# Altium schematic symbol library Altium_Lib_Haris.SchLib: 265 symbols (part 2 of 2)
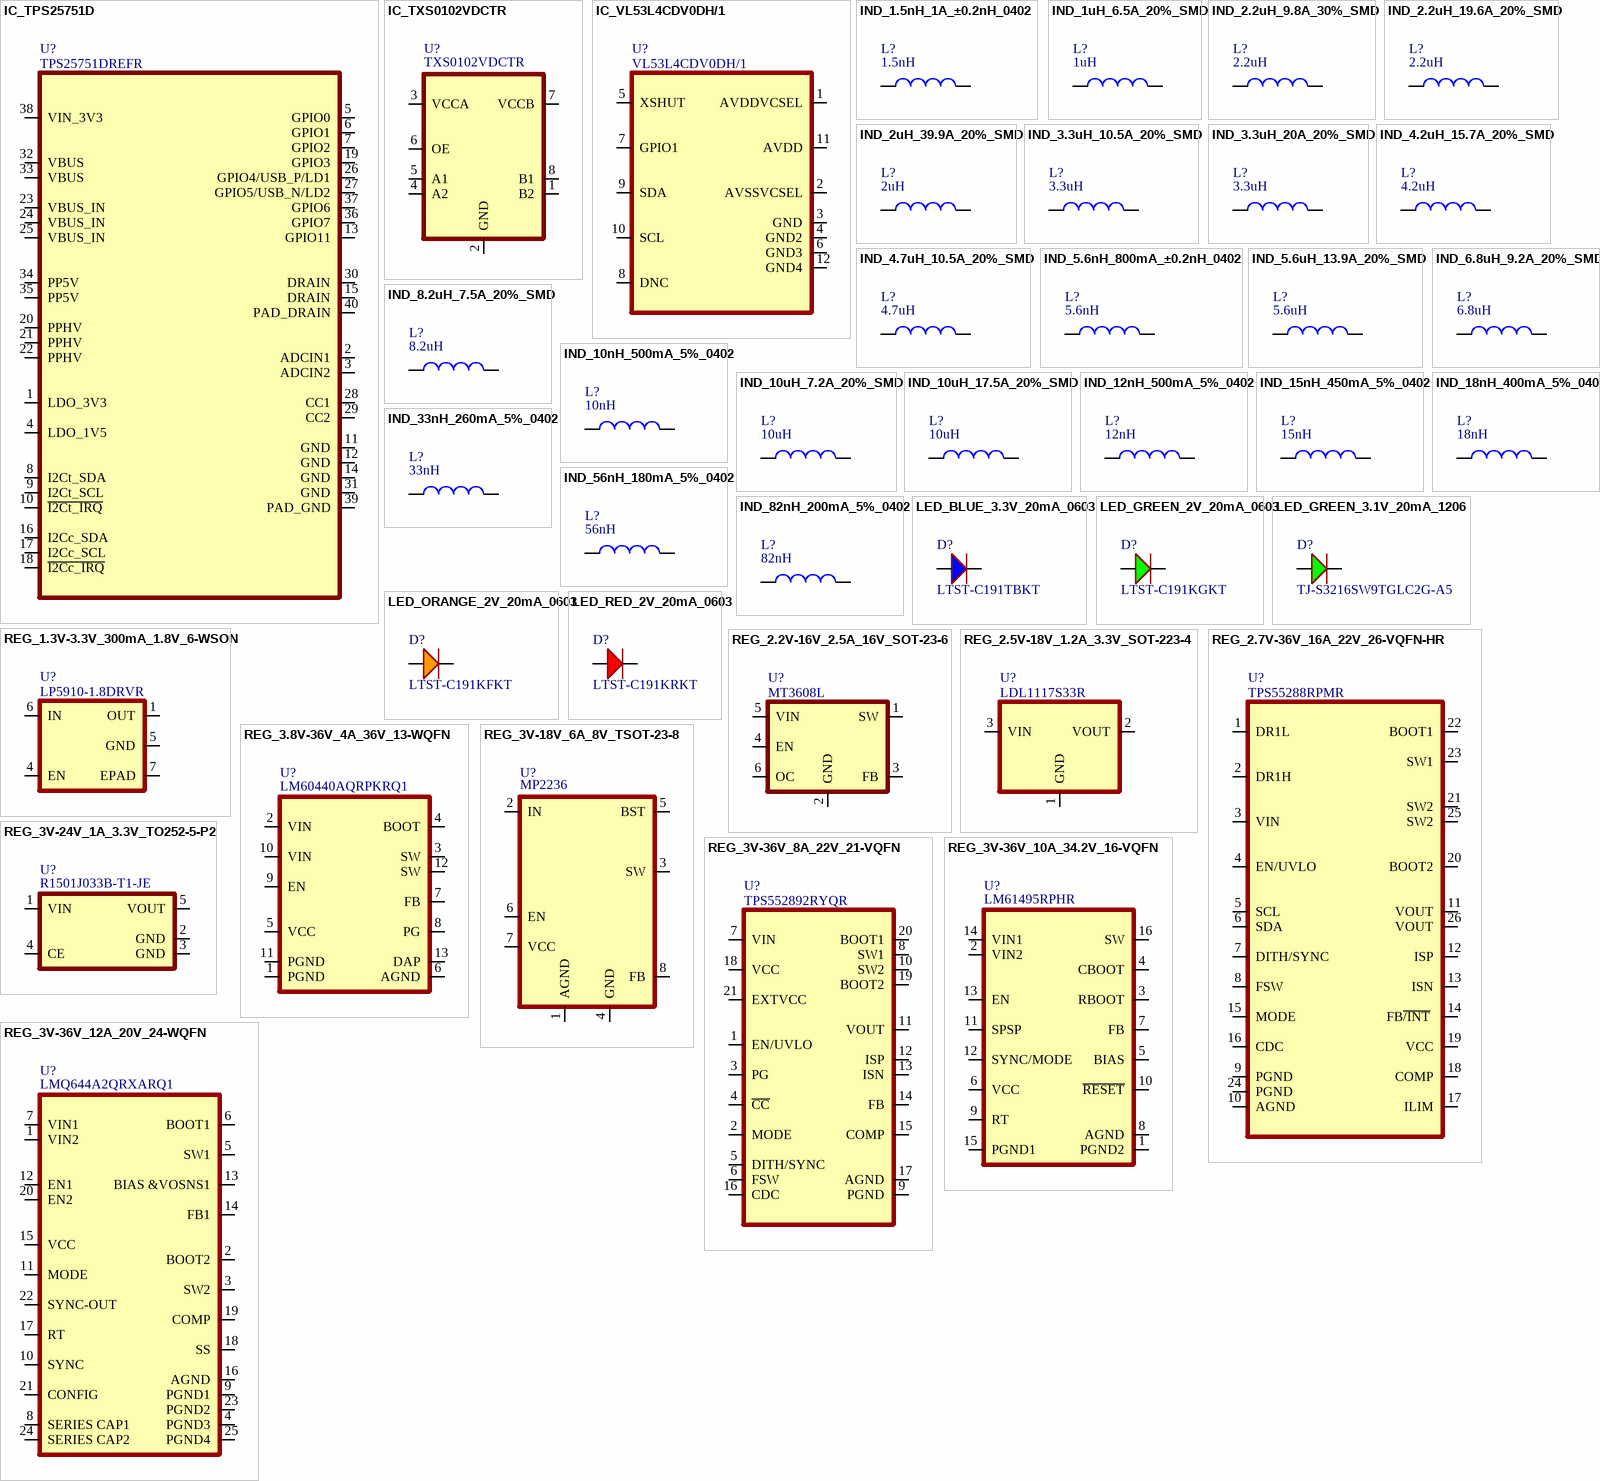
[diagram p9: symbols IC_TPS25751D to REG_3V-36V_12A_20V_24-WQFN]

## IC_TPS25751D
designator U?, comment TPS25751DREFR
USB, Type-C Controller PMIC 38-WQFN (4x6); Manufacturer: Texas Instruments; Manufacturer Part Number: TPS25751DREFR; Supplier: Digikey; Supplier Part Number: 296-TPS25751DREFRTR-ND; Case/Package: 38-WQFN
footprint QFN40P400X600X100-39N
pins: 1 LDO_3V3, 2 ADCIN1, 3 ADCIN2, 4 LDO_1V5, 5 GPIO0, 6 GPIO1, 7 GPIO2, 8 I2Ct_SDA, 9 I2Ct_SCL, 10 ~{I2Ct_IRQ}, 11 GND, 12 GND, 13 GPIO11, 14 GND, 15 DRAIN, 16 I2Cc_SDA, 17 I2Cc_SCL, 18 ~{I2Cc_IRQ}, 19 GPIO3, 20 PPHV, 21 PPHV, 22 PPHV, 23 VBUS_IN, 24 VBUS_IN, 25 VBUS_IN, 26 GPIO4/USB_P/LD1, 27 GPIO5/USB_N/LD2, 28 CC1, 29 CC2, 30 DRAIN, 31 GND, 32 VBUS, 33 VBUS, 34 PP5V, 35 PP5V, 36 GPIO7, 37 GPIO6, 38 VIN_3V3, 39 PAD_GND, 40 PAD_DRAIN

## IC_TXS0102VDCTR
designator U?, comment TXS0102VDCTR
Voltage Level Translator Bidirectional 1 Circuit 2 Channel 24Mbps SM8; Manufacturer: Texas Instruments; Manufacturer Part Number: TXS0102VDCTR; Supplier: Digikey; Supplier Part Number: 296-TXS0102VDCTR-ND; Case/Package: SM8
pins: 1 B2, 2 GND, 3 VCCA, 4 A2, 5 A1, 6 OE, 7 VCCB, 8 B1

## IC_VL53L4CDV0DH/1
designator U?, comment VL53L4CDV0DH/1
SENSOR OPTICAL 6-18CM I2C; Manufacturer: STMicroelectronics; Manufacturer Part Number: VL53L4CDV0DH/1; Supplier: DigiKey; Supplier Part Number: 497-VL53L4CDV0DH/1TR-ND; ComponentLink1Description: Datasheet; ComponentLink1URL: *
pins: 1 AVDDVCSEL, 2 AVSSVCSEL, 3 GND, 4 GND2, 5 XSHUT, 6 GND3, 7 GPIO1, 8 DNC, 9 SDA, 10 SCL, 11 AVDD, 12 GND4

## IND_1.5nH_1A_±0.2nH_0402
designator L?, comment value 1.5nH  (hidden comment: LQW15AN1N5C00D)
FIXED IND 1.5NH 1A 30 MOHM SMD; Manufacturer: Murata Electronics; Manufacturer Part Number: LQW15AN1N5C00D; Supplier: DigiKey; Supplier Part Number: 490-6783-2-ND; Case/Package: 0402
pins: 1, 2

## IND_1uH_6.5A_20%_SMD
designator L?, comment value 1uH  (hidden comment: XFL5030-102MEC)
FIXED IND 1UH 6.5A 5 MOHM; Manufacturer: Coilcraft; Manufacturer Part Number: XFL5030-102MEC; Supplier: Coilcraft; Supplier Part Number: XFL5030-102MEC; Case/Package: SMD,5.48x5.28
footprint IND_XFL5030-102MEC
pins: 1, 2

## IND_2.2uH_9.8A_30%_SMD
designator L?, comment value 2.2uH  (hidden comment: SRN8040TA-2R2Y)
FIXED IND 2.2UH 7.4A 11.5 MOHM; Manufacturer: Bourns Inc.; Manufacturer Part Number: SRN8040TA-2R2Y; Supplier: Digikey; Supplier Part Number: SRN8040TA-2R2YTR-ND; Case/Package: SMD
footprint IND_SRN8040TA-2R2Y
pins: 1, 2

## IND_2.2uH_19.6A_20%_SMD
designator L?, comment value 2.2uH  (hidden comment: XAL7070-222MEB)
FIXED IND 2.2UH 19.6A 6.33 MOHM; Manufacturer: Coilcraft; Manufacturer Part Number: XAL7070-222MEB; Supplier: Coilcraft; Supplier Part Number: XAL7070-222MEB; Case/Package: SMD,7.5x7.2
footprint IND_XAL7070-222MEB
pins: 1, 2

## IND_2uH_39.9A_20%_SMD
designator L?, comment value 2uH  (hidden comment: XAL1580-202MED)
FIXED IND 1UH 39.9A 2.29 MOHM; Manufacturer: Coilcraft; Manufacturer Part Number: XAL1580-202MED; Supplier: Coilcraft; Supplier Part Number: XAL1580-202MED; Case/Package: SMD,5.48x5.28
footprint IND_ XAL1580-202MED
pins: 1, 2

## IND_3.3uH_10.5A_20%_SMD
designator L?, comment value 3.3uH  (hidden comment: SRP5030HMCT-3R3M)
FIXED IND 3.3UH 10A 21MOHM SMD; Manufacturer: Bourns Inc.; Manufacturer Part Number: SRP5030HMCT-3R3M; Supplier: Digikey; Supplier Part Number: 118-SRP5030HMCT-3R3MTR-ND; Case/Package: SMD; ComponentLink1Description: Datasheet; ComponentLink1URL: https://www.bourns.com/docs/Product-Datasheets/SRP5030HMCT.pdf
footprint IND_5.3x5.2
pins: 1, 2

## IND_3.3uH_20A_20%_SMD
designator L?, comment value 3.3uH  (hidden comment: IHLP3232DZER3R3M01)
FIXED IND 3.3UH 9.2A 17.7 MOHM; Manufacturer: Vishay Dale; Manufacturer Part Number: IHLP3232DZER3R3M01; Supplier: Digikey; Supplier Part Number: 541-1373-2-ND; Case/Package: SMD
footprint IND_IHLP-3232DZ_VIS-M
pins: 1, 2

## IND_4.2uH_15.7A_20%_SMD
designator L?, comment value 4.2uH  (hidden comment: 784325042)
FIXED IND 4.2UH 11A 7.8 MOHM SMD; Manufacturer: Würth Elektronik; Manufacturer Part Number: 784325042; Supplier: Digikey; Supplier Part Number: 732-784325042TR-ND; Case/Package: SMD
footprint WE-HCIA_1050
pins: 1, 2

## IND_4.7uH_10.5A_20%_SMD
designator L?, comment value 4.7uH  (hidden comment: XAL6060-472)
FIXED IND 4.7UH 10.5A 14.4 MOHM; Manufacturer: Coilcraft; Manufacturer Part Number: XAL6060-472; Supplier: Coilcraft; Supplier Part Number: XAL6060-472; Case/Package: SMD
pins: 1, 2

## IND_5.6nH_800mA_±0.2nH_0402
designator L?, comment value 5.6nH  (hidden comment: LQW15AN5N6C10D)
FIXED IND 5.6NH 800MA 51 MOHM; Manufacturer: Murata Electronics; Manufacturer Part Number: LQW15AN5N6C10D; Supplier: DigiKey; Supplier Part Number: 490-6833-2-ND; Case/Package: 0402
pins: 1, 2

## IND_5.6uH_13.9A_20%_SMD
designator L?, comment value 5.6uH  (hidden comment: 74439387056)
FIXED IND 5.6UH 13.9A 13.32 MOHM SMD; Manufacturer: Würth Elektronik; Manufacturer Part Number: 74439387056; Supplier: Digikey; Supplier Part Number: 732-74439387056TR-ND; Case/Package: SMD,7.9x7.6
footprint IND_74439387056
pins: 1, 2

## IND_6.8uH_9.2A_20%_SMD
designator L?, comment value 6.8uH  (hidden comment: XAL6060-682)
FIXED IND 6.8UH 9.2A 20.8 MOHM SMD; Manufacturer: Coilcraft; Manufacturer Part Number: XAL6060-682; Supplier: Mouser; Supplier Part Number: 994-XAL6060-682MEB; Case/Package: SMD,6.56x6.36
pins: 1, 2

## IND_8.2uH_7.5A_20%_SMD
designator L?, comment value 8.2uH  (hidden comment: IHLP2525CZER8R2M01)
FIXED IND 8.2UH 4A 68 MOHM SMD; Manufacturer: Vishay Dale; Manufacturer Part Number: IHLP2525CZER8R2M01; Supplier: Digikey; Supplier Part Number: 541-1012-2-ND; Case/Package: SMD,6.86x6.47
footprint IND_IHLP2525CZER8R2M01
pins: 1, 2

## IND_10nH_500mA_5%_0402
designator L?, comment value 10nH  (hidden comment: LQG15HS10NJ02D)
FIXED IND 10NH 500MA 260 MOHM; Manufacturer: Murata Electronics; Manufacturer Part Number: LQG15HS10NJ02D; Supplier: DigiKey; Supplier Part Number: 490-2623-2-ND; Case/Package: 0402
pins: 1, 2

## IND_10uH_7.2A_20%_SMD
designator L?, comment value 10uH  (hidden comment: SER1360-103KLB)
FIXED IND 10UH 7.2A 10.81 MOHM SMD; Manufacturer: Coilcraft; Manufacturer Part Number: SER1360-103KLB; Supplier: Coilcraft; Supplier Part Number: SER1360-103KLB; Case/Package: SMD,13x13
footprint IND_SER1360-103
pins: 1, 2

## IND_10uH_17.5A_20%_SMD
designator L?, comment value 10uH  (hidden comment: XAL1010-103)
FIXED IND 10UH 17.5A 14.75 MOHM SMD; Manufacturer: Coilcraft; Manufacturer Part Number: XAL1010-103; Supplier: Coilcraft; Supplier Part Number: XAL1010-103; Case/Package: SMD,10x8
footprint IND_XAL1010-103MED
pins: 1, 2

## IND_12nH_500mA_5%_0402
designator L?, comment value 12nH  (hidden comment: LQG15HS12NJ02D)
FIXED IND 12NH 500MA 280 MOHM; Manufacturer: Murata Electronics; Manufacturer Part Number: LQG15HS12NJ02D; Supplier: DigiKey; Supplier Part Number: 490-2624-2-ND; Case/Package: 0402
pins: 1, 2

## IND_15nH_450mA_5%_0402
designator L?, comment value 15nH  (hidden comment: LQG15HS15NJ02D)
FIXED IND 15NH 450MA 320 MOHM; Manufacturer: Murata Electronics; Manufacturer Part Number: LQG15HS15NJ02D; Supplier: DigiKey; Supplier Part Number: 490-2625-2-ND; Case/Package: 0402
pins: 1, 2

## IND_18nH_400mA_5%_0402
designator L?, comment value 18nH  (hidden comment: LQG15HS18NJ02D)
FIXED IND 18NH 400MA 360 MOHM; Manufacturer: Murata Electronics; Manufacturer Part Number: LQG15HS18NJ02D; Supplier: DigiKey; Supplier Part Number: 490-2626-2-ND; Case/Package: 0402
pins: 1, 2

## IND_33nH_260mA_5%_0402
designator L?, comment value 33nH  (hidden comment: LQW15AN33NJ00D)
FIXED IND 33NH 260MA 630 MOHM; Manufacturer: Murata Electronics; Manufacturer Part Number: LQW15AN33NJ00D; Supplier: DigiKey; Supplier Part Number: 490-1152-2-ND; Case/Package: 0402
pins: 1, 2

## IND_56nH_180mA_5%_0402
designator L?, comment value 56nH  (hidden comment: MHQ1005P56NJT000)
FIXED IND 56NH 180MA 1.8 OHM SMD; Manufacturer: TDK; Manufacturer Part Number: MHQ1005P56NJT000; Supplier: Digikey; Supplier Part Number: 445-MHQ1005P56NJT000TR-ND; Case/Package: 0402
pins: 1, 2

## IND_82nH_200mA_5%_0402
designator L?, comment value 82nH  (hidden comment: LQG15HS82NJ02D)
FIXED IND 82NH 200MA 1.2 OHM SMD; Manufacturer: Murata Electronics; Manufacturer Part Number: LQG15HS82NJ02D; Supplier: DigiKey; Supplier Part Number: 490-2634-2-ND; Case/Package: 0402
pins: 1, 2

## LED_BLUE_3.3V_20mA_0603
designator D?, comment LTST-C191TBKT
Blue 470nm LED Indication - Discrete 3.3V 0603 (1608 Metric); Manufacturer: Lite-On Inc.; Value: 20mA; Supplier Part Number: 160-1647-2-ND; Manufacturer Part Number: LTST-C191TBKT; Case/Package: 0603; Supplier: DigiKey
pins: A, K

## LED_GREEN_2V_20mA_0603
designator D?, comment LTST-C191KGKT
Green 571nm LED Indication - Discrete 2V 0603 (1608 Metric); Manufacturer: Lite-On Inc.; Value: 20mA; Supplier Part Number: 160-1446-2-ND; Manufacturer Part Number: LTST-C191KGKT; Case/Package: 0603; Supplier: DigiKey
pins: A, K

## LED_GREEN_3.1V_20mA_1206
designator D?, comment TJ-S3216SW9TGLC2G-A5
LED EMERALD GREEN WATER CLEAR 1206 SMD; Manufacturer: TOGIALED; Value: 20mA; Supplier Part Number: C192678; Manufacturer Part Number: TJ-S3216SW9TGLC2G-A5; Case/Package: 1206; Supplier: LCSC
footprint LED_1206 (1206)
pins: A, K

## LED_ORANGE_2V_20mA_0603
designator D?, comment LTST-C191KFKT
Orange 605nm LED Indication - Discrete 2V 0603 (1608 Metric); Manufacturer: Lite-On Inc.; Value: 20mA; Supplier Part Number: 160-1445-2-ND; Manufacturer Part Number: LTST-C191KFKT; Case/Package: 0603; Supplier: DigiKey
pins: A, K

## LED_RED_2V_20mA_0603
designator D?, comment LTST-C191KRKT
Red 631nm LED Indication - Discrete 2V 0603 (1608 Metric); Manufacturer: Lite-On Inc.; Value: 20mA; Supplier Part Number: 160-1447-2-ND; Manufacturer Part Number: LTST-C191KRKT; Case/Package: 0603; Supplier: DigiKey
pins: A, K

## REG_1.3V-3.3V_300mA_1.8V_6-WSON
designator U?, comment LP5910-1.8DRVR
Linear Voltage Regulator IC Positive Fixed 1 Output 300mA 6-WSON (2x2); Manufacturer: Texas Instruments; Manufacturer Part Number: LP5910-1.8DRVR; Supplier: Digikey; Supplier Part Number: 296-47212-2-ND; Case/Package: 6-WSON (2x2); ComponentLink1Description: Datasheet; ComponentLink1URL: https://www.ti.com/general/docs/suppproductinfo.tsp?distId=10&gotoUrl=https%3A%2F%2Fwww.ti.com%2Flit%2Fgpn%2Flp5910
footprint SON65P200X200X80-7N
pins: 1 OUT, 4 EN, 5 GND, 6 IN, 7 EPAD

## REG_2.2V-16V_2.5A_16V_SOT-23-6
designator U?, comment MT3608L
1.2MHz Boost Adjustable 600mV~20V 2.5A SOT-23-6 Voltage Regulators - DC DC Switching Regulators RoHS; Manufacturer: XI'AN Aerosemi Tech; Manufacturer Part Number: MT3608L; Supplier: LCSC; Supplier Part Number: C2932326; Case/Package: SOT23-6; ComponentLink1Description: Datasheet; ComponentLink1URL: https://www.lcsc.com/datasheet/C2932326.pdf?spm=wm.fly.bg.0.pdf&lcsc_vid=TlkNUgdQRlhXXlUHRlFaUgUFQAULBFEFEVJYUVwHQgUxVlNeQVFfUlFfQFVXXzsOAxUeFF5JWBYZEEoKFBINSQcJGk4NBhADEA4cHkteQ1NADxALGw%3D%3D
footprint SOT23P700X180-6N
pins: 1 SW, 2 GND, 3 FB, 4 EN, 5 VIN (power), 6 OC

## REG_2.5V-18V_1.2A_3.3V_SOT-223-4
designator U?, comment LDL1117S33R
LDO Voltage Regulators 1.2 A High PSRR low dropout linear voltage regulator; Manufacturer: STMicroelectronics; Manufacturer Part Number: LDL1117S33R; Supplier: Mouser; Supplier Part Number: 511-LDL1117S33R; Case/Package: SOT-223-4
pins: 1 GND, 2 VOUT, 3 VIN

## REG_2.7V-36V_16A_22V_26-VQFN-HR
designator U?, comment TPS55288RPMR
Buck-Boost Switching Regulator IC Positive Programmable 0.8V 1 Output 16A 26-PowerVFQFN; Manufacturer: Texas Instruments; Manufacturer Part Number: TPS55288RPMR; Supplier: Digikey; Supplier Part Number: 296-TPS55288RPMRTR-ND; Case/Package: 26VQFN
footprint IC_TPS55288RPMR
pins: 1 DR1L, 2 DR1H, 3 VIN, 4 EN/UVLO, 5 SCL, 6 SDA, 7 DITH/SYNC, 8 FSW, 9 PGND, 10 AGND, 11 VOUT, 12 ISP, 13 ISN, 14 FB~{/INT} , 15 MODE, 16 CDC, 17 ILIM, 18 COMP, 19 VCC, 20 BOOT2, 21 SW2, 22 BOOT1, 23 SW1, 24 PGND, 25 SW2, 26 VOUT

## REG_3.8V-36V_4A_36V_13-WQFN
designator U?, comment LM60440AQRPKRQ1
Buck Switching Regulator IC Positive Adjustable 1V 1 Output 4A 13-PowerWFQFN; Manufacturer: Texas Instruments; Manufacturer Part Number: LM60440AQRPKRQ1; Supplier: Digikey; Supplier Part Number: 296-LM60440AQRPKRQ1TR-ND; Case/Package: 13WQFN
footprint RPK0013A-MFG
pins: 1 PGND, 2 VIN, 3 SW, 4 BOOT, 5 VCC, 6 AGND, 7 FB, 8 PG, 9 EN, 10 VIN, 11 PGND, 12 SW, 13 DAP

## REG_3V-18V_6A_8V_TSOT-23-8
designator U?, comment MP2236
Buck Switching Regulator IC Positive Adjustable 0.6V 1 Output 6A SOT-23-8 Thin, TSOT-23-8; Manufacturer: Monolithic Power Systems Inc.; Manufacturer Part Number: MP2236CGJ-Z; Supplier: Digikey; Supplier Part Number: 1589-MP2236CGJ-ZTR-ND; Case/Package: TSOT-23-8; ComponentLink1Description: Datasheet; ComponentLink1URL: https://www.monolithicpower.com/en/documentview/productdocument/index/version/2/document_type/Datasheet/lang/en/sku/MP2236/document_id/4411/
footprint TSOT65P280X145-8N
pins: 1 AGND, 2 IN, 3 SW, 4 GND, 5 BST, 6 EN, 7 VCC, 8 FB

## REG_3V-24V_1A_3.3V_TO252-5-P2
designator U?, comment R1501J033B-T1-JE
Linear Voltage Regulator IC Positive Fixed 1 Output 1A TO-252-5-P2; Manufacturer: Nisshinbo Micro Devices Inc.; Manufacturer Part Number: R1501J033B-T1-JE; Supplier: Digikey; Supplier Part Number: 2129-R1501J033B-T1-JETR-ND; Case/Package: TO-252-5-P2
footprint TO252P100X600X230-5N
pins: 1 VIN, 2 GND, 3 GND, 4 CE, 5 VOUT

## REG_3V-36V_8A_22V_21-VQFN
designator U?, comment TPS552892RYQR
Buck-Boost Switching Regulator IC Positive Programmable 0.8V 1 Output 8A 21-PowerVFQFN; Manufacturer: Texas Instruments; Manufacturer Part Number: TPS552892RYQR; Supplier: Digikey; Supplier Part Number: 296-TPS552892RYQRTR-ND; Case/Package: 21VQFN
footprint QFN50P300X500100-21N
pins: 1 EN/UVLO, 2 MODE, 3 PG, 4 ~{CC}, 5 DITH/SYNC, 6 FSW, 7 VIN, 8 SW1, 9 PGND, 10 SW2, 11 VOUT, 12 ISP, 13 ISN, 14 FB, 15 COMP, 16 CDC, 17 AGND, 18 VCC, 19 BOOT2, 20 BOOT1, 21 EXTVCC

## REG_3V-36V_10A_34.2V_16-VQFN
designator U?, comment LM61495RPHR
Buck Switching Regulator IC Positive Adjustable 1V 1 Output 10A 16-PowerVFQFN; Manufacturer: Texas Instruments; Manufacturer Part Number: LM61495RPHR; Supplier: Digikey; Supplier Part Number: 296-LM61495RPHRTR-ND; Case/Package: 16VQFN
footprint RPH0016A
pins: 1 PGND2, 2 VIN2, 3 RBOOT, 4 CBOOT, 5 BIAS, 6 VCC, 7 FB, 8 AGND, 9 RT, 10 ~{RESET}, 11 SPSP, 12 SYNC/MODE, 13 EN, 14 VIN1, 15 PGND1, 16 SW

## REG_3V-36V_12A_20V_24-WQFN
designator U?, comment LMQ644A2QRXARQ1
Buck Switching Regulator IC Positive Adjustable 0.8V 1 Output 6A, 6A 24-PowerTFQFN; Manufacturer: Texas Instruments; Manufacturer Part Number: LMQ644A2QRXARQ1; Supplier: Digikey; Supplier Part Number: 296-LMQ644A2QRXARQ1TR-ND; Case/Package: 24WQFN
pins: 1 VIN2, 2 BOOT2, 3 SW2, 4 PGND3, 5 SW1, 6 BOOT1, 7 VIN1, 8 SERIES CAP1, 9 PGND1, 10 SYNC, 11 MODE, 12 EN1, 13 BIAS &VOSNS1, 14 FB1, 15 VCC, 16 AGND, 17 RT, 18 SS, 19 COMP, 20 EN2, 21 CONFIG, 22 SYNC-OUT, 23 PGND2, 24 SERIES CAP2, 25 PGND4

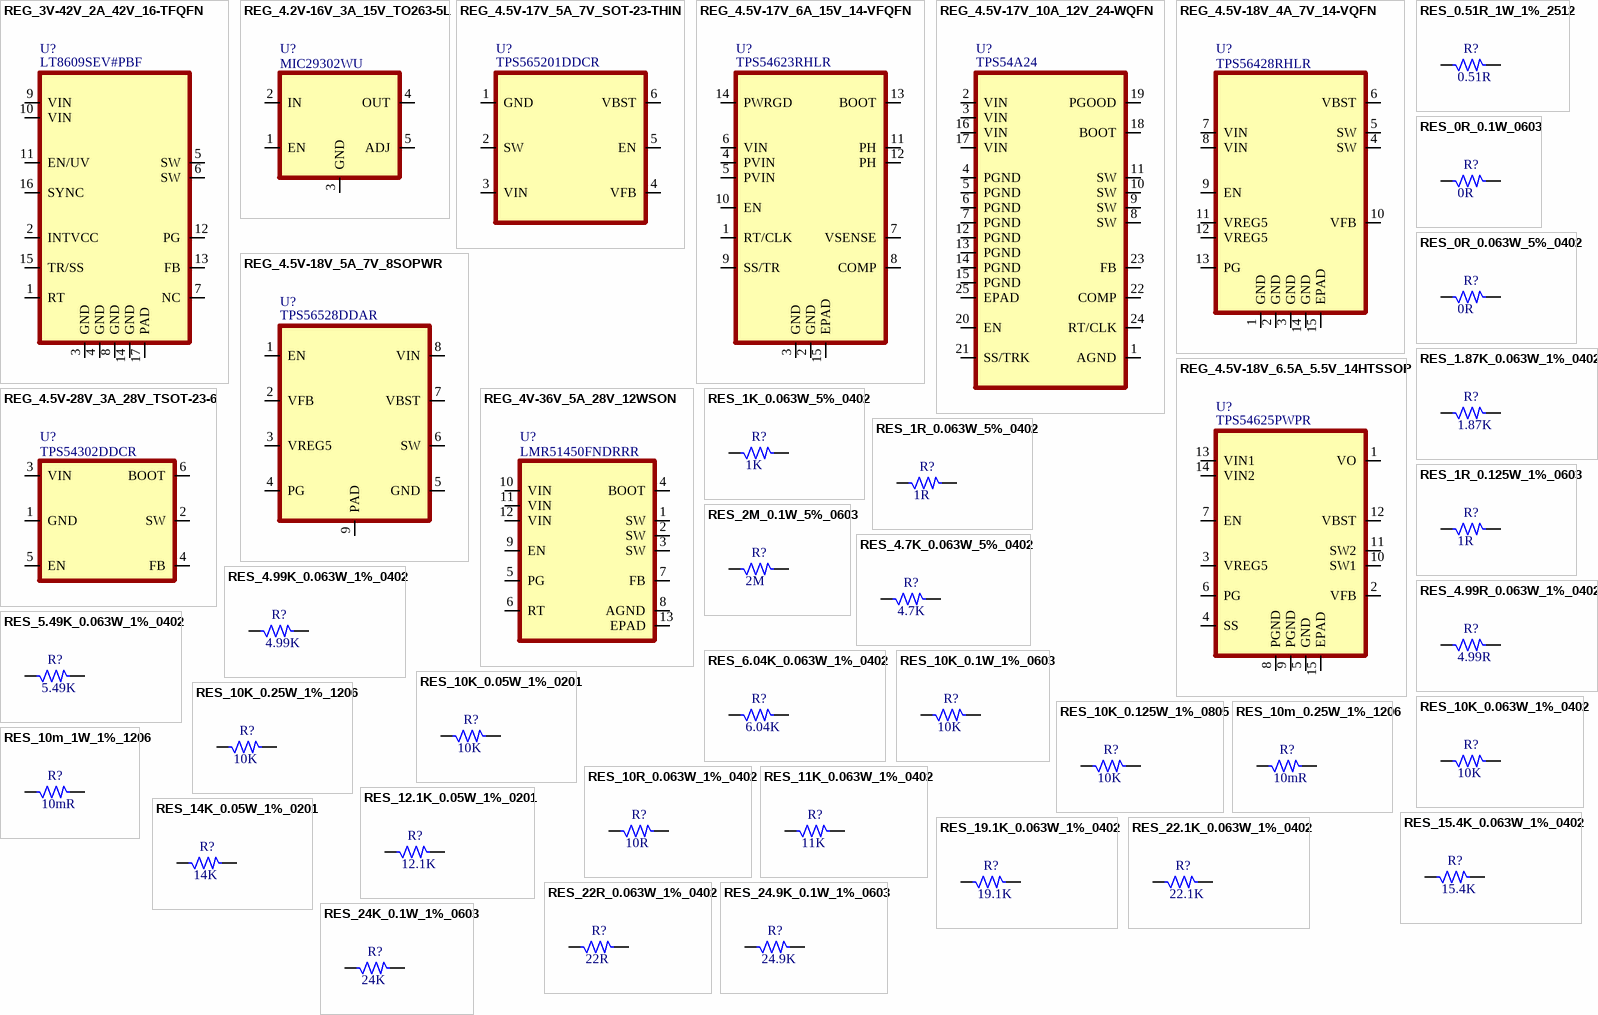
[diagram p6: symbols REG_3V-42V_2A_42V_16-TFQFN to RES_24K_0.1W_1%_0603]

## REG_3V-42V_2A_42V_16-TFQFN
designator U?, comment LT8609SEV#PBF
Buck Switching Regulator IC Positive Adjustable 0.782V 1 Output 2A 16-TFQFN Exposed Pad; Manufacturer: Analog Devices Inc.; Manufacturer Part Number: LT8609SEV#PBF; Supplier: Digikey; Supplier Part Number: 505-LT8609SEV#PBF-ND; Case/Package: 16-LQFN (3x3); ComponentLink1Description: Datasheet; ComponentLink1URL: https://www.analog.com/media/en/technical-documentation/data-sheets/lt8609s.pdf
footprint QFN50P300X300X80-17N
pins: 1 RT, 2 INTVCC, 3 GND, 4 GND, 5 SW, 6 SW, 7 NC, 8 GND, 9 VIN, 10 VIN, 11 EN/UV, 12 PG, 13 FB, 14 GND, 15 TR/SS, 16 SYNC, 17 PAD

## REG_4.2V-16V_3A_15V_TO263-5L
designator U?, comment MIC29302WU
Linear Voltage Regulator IC Positive Adjustable 1 Output 3A TO-263-5L; Manufacturer: UMW; Manufacturer Part Number: MIC29302WU; Supplier: Digikey; Supplier Part Number: 4518-MIC29302WUTR-ND; Case/Package: TO263-5L
pins: 1 EN, 2 IN, 3 GND, 4 OUT, 5 ADJ

## REG_4.5V-17V_5A_7V_SOT-23-THIN
designator U?, comment TPS565201DDCR
Buck Switching Regulator IC Positive Adjustable 0.6V 1 Output 5A SOT-23-6 Thin, TSOT-23-6; Manufacturer: Texas Instruments; Manufacturer Part Number: TPS565201DDCR; Supplier: Digikey; Supplier Part Number: 296-49006-2-ND; Case/Package: SOT-23-THIN; ComponentLink1Description: Datasheet; ComponentLink1URL: https://www.ti.com/lit/ds/symlink/tps565201.pdf?HQS=dis-dk-null-digikeymode-dsf-pf-null-wwe&ts=1785477902272&ref_url=https%253A%252F%252Fwww.ti.com%252Fgeneral%252Fdocs%252Fsuppproductinfo.tsp%253FdistId%253D10%2526gotoUrl%253Dhttps%253A%252F%252Fwww.ti.com%252Flit%252Fgpn%252Ftps565201
footprint SOT95P280X110-6N
pins: 1 GND, 2 SW, 3 VIN, 4 VFB, 5 EN, 6 VBST

## REG_4.5V-17V_6A_15V_14-VFQFN
designator U?, comment TPS54623RHLR
Buck Switching Regulator IC Positive Adjustable 0.6V 1 Output 6A 14-VFQFN Exposed Pad; Manufacturer: Texas Instruments; Manufacturer Part Number: TPS54623RHLR; Supplier: Digikey; Supplier Part Number: 296-49319-2-ND; Case/Package: 14VQFN; ComponentLink1Description: Datasheet; ComponentLink1URL: https://www.ti.com/lit/ds/symlink/tps54623.pdf?HQS=dis-dk-null-digikeymode-dsf-pf-null-wwe&ts=1785765528200&ref_url=https%253A%252F%252Fwww.ti.com%252Fgeneral%252Fdocs%252Fsuppproductinfo.tsp%253FdistId%253D10%2526gotoUrl%253Dhttps%253A%252F%252Fwww.ti.com%252Flit%252Fgpn%252Ftps54623
footprint QFN50P350X350X100-15N
pins: 1 RT/CLK, 2 GND, 3 GND, 4 PVIN, 5 PVIN, 6 VIN, 7 VSENSE, 8 COMP, 9 SS/TR, 10 EN, 11 PH, 12 PH, 13 BOOT, 14 PWRGD, 15 EPAD

## REG_4.5V-17V_10A_12V_24-WQFN
designator U?, comment TPS54A24
Buck Switching Regulator IC Positive Adjustable 0.6V 1 Output 10A 24-WFQFN Exposed Pad; Manufacturer: Texas Instruments; Manufacturer Part Number: TPS54A24RTWR; Supplier: Digikey; Supplier Part Number: 296-53562-2-ND; Case/Package: 24WQFN; ComponentLink1Description: Datasheet; ComponentLink1URL: https://www.ti.com/lit/ds/symlink/tps54a24.pdf?HQS=dis-dk-null-digikeymode-dsf-pf-null-wwe&ts=1785841245575&ref_url=https%253A%252F%252Fwww.ti.com%252Fgeneral%252Fdocs%252Fsuppproductinfo.tsp%253FdistId%253D10%2526gotoUrl%253Dhttps%253A%252F%252Fwww.ti.com%252Flit%252Fgpn%252Ftps54a24
footprint QFN50P400X400X80-25N
pins: 1 AGND, 2 VIN, 3 VIN, 4 PGND, 5 PGND, 6 PGND, 7 PGND, 8 SW, 9 SW, 10 SW, 11 SW, 12 PGND, 13 PGND, 14 PGND, 15 PGND, 16 VIN, 17 VIN, 18 BOOT, 19 PGOOD, 20 EN, 21 SS/TRK, 22 COMP, 23 FB, 24 RT/CLK, 25 EPAD

## REG_4.5V-18V_4A_7V_14-VQFN
designator U?, comment TPS56428RHLR
Buck Switching Regulator IC Positive Adjustable 0.6V 1 Output 4A 14-VFQFN Exposed Pad; Manufacturer: Texas Instruments; Manufacturer Part Number: TPS56428RHLR; Supplier: Digikey; Supplier Part Number: 296-50108-2-ND; Case/Package: 14VQFN; ComponentLink1Description: Datasheet; ComponentLink1URL: https://www.ti.com/lit/ds/symlink/tps54623.pdf?HQS=dis-dk-null-digikeymode-dsf-pf-null-wwe&ts=1785765528200&ref_url=https%253A%252F%252Fwww.ti.com%252Fgeneral%252Fdocs%252Fsuppproductinfo.tsp%253FdistId%253D10%2526gotoUrl%253Dhttps%253A%252F%252Fwww.ti.com%252Flit%252Fgpn%252Ftps54623
footprint QFN50P350X350X100-15N
pins: 1 GND, 2 GND, 3 GND, 4 SW, 5 SW, 6 VBST, 7 VIN, 8 VIN, 9 EN, 10 VFB, 11 VREG5, 12 VREG5, 13 PG, 14 GND, 15 EPAD

## REG_4.5V-18V_5A_7V_8SOPWR
designator U?, comment TPS56528DDAR
Buck Switching Regulator IC Positive Adjustable 0.6V 1 Output 5A 8-PowerSOIC (0.154", 3.90mm Width); Manufacturer: Texas Instruments; Manufacturer Part Number: TPS56528DDAR; Supplier: Digikey; Supplier Part Number: 296-35857-2-ND; Case/Package: 8SOPWR; ComponentLink1Description: Datasheet; ComponentLink1URL: https://www.ti.com/lit/ds/symlink/tps56528.pdf?ts=1785478101912&ref_url=https%253A%252F%252Fwww.google.com%252F
footprint SOIC127P600X175-8N
pins: 1 EN, 2 VFB, 3 VREG5, 4 PG, 5 GND, 6 SW, 7 VBST, 8 VIN, 9 PAD

## REG_4.5V-18V_6.5A_5.5V_14HTSSOP
designator U?, comment TPS54625PWPR
Buck Switching Regulator IC Positive Adjustable 0.765V 1 Output 6.5A 14-PowerTSSOP (0.173", 4.40mm Width); Manufacturer: Texas Instruments; Manufacturer Part Number: TPS54625PWPR; Supplier: Digikey; Supplier Part Number: 296-40806-2-ND; Case/Package: 14HTSSOP; ComponentLink1Description: Datasheet; ComponentLink1URL: https://www.ti.com/lit/ds/symlink/tps54625.pdf?HQS=dis-dk-null-digikeymode-dsf-pf-null-wwe&ts=1785842043300&ref_url=https%253A%252F%252Fwww.ti.com%252Fgeneral%252Fdocs%252Fsuppproductinfo.tsp%253FdistId%253D10%2526gotoUrl%253Dhttps%253A%252F%252Fwww.ti.com%252Flit%252Fgpn%252Ftps54625
footprint HTSSOP65P640X120-15N
pins: 1 VO, 2 VFB, 3 VREG5, 4 SS, 5 GND, 6 PG, 7 EN, 8 PGND, 9 PGND, 10 SW1, 11 SW2, 12 VBST, 13 VIN1, 14 VIN2, 15 EPAD

## REG_4.5V-28V_3A_28V_TSOT-23-6
designator U?, comment TPS54302DDCR
Buck Switching Regulator IC Positive Adjustable 0.596V 1 Output 3A SOT-23-6 Thin, TSOT-23-6; Manufacturer: Texas Instruments; Manufacturer Part Number: TPS54302DDCR; Supplier: Digikey; Supplier Part Number: 296-46237-2-ND; Case/Package: SOT-23-6; ComponentLink1Description: Datasheet; ComponentLink1URL: https://www.ti.com/lit/ds/symlink/tps54302.pdf?ts=1783496645768
footprint SOT95P280X110-6N
pins: 1 GND, 2 SW, 3 VIN, 4 FB, 5 EN, 6 BOOT

## REG_4V-36V_5A_28V_12WSON
designator U?, comment LMR51450FNDRRR
Buck Switching Regulator IC Positive Adjustable 0.8V 1 Output 5A 12-WFDFN Exposed Pad; Manufacturer: Texas Instruments; Manufacturer Part Number: LMR51450FNDRRR; Supplier: Digikey; Supplier Part Number: 296-LMR51450FNDRRRTR-ND; Case/Package: 12WSON
pins: 1 SW, 2 SW, 3 SW, 4 BOOT, 5 PG, 6 RT, 7 FB, 8 AGND, 9 EN, 10 VIN, 11 VIN, 12 VIN, 13 EPAD

## RES_0.51R_1W_1%_2512
designator R?, comment 0.51R
RES 0.51 OHM 1% 1W 2512; Manufacturer: Panasonic Industry; Manufacturer Part Number: ERJ-1TRQFR51U; Supplier: Digikey; Supplier Part Number: PT.51YTR-ND; Case/Package: 2512; Value: 0.51R
footprint RES_2512 (CASE: 2512)
pins: 1, 2

## RES_0R_0.1W_0603
designator R?, comment 0R
RES 0 OHM JUMPER 1/10W 0603; Manufacturer: Bourns Inc.; Manufacturer Part Number: CR0603AJ/-000ELF; Supplier: Digikey; Supplier Part Number: 118-CR0603AJ/-000ELFTR-ND; Case/Package: 0603; Value: 0R
pins: 1, 2

## RES_0R_0.063W_5%_0402
designator R?, comment 0R
RES 0402 0R JUMPER 63MW; Manufacturer: Bourns Inc.; Manufacturer Part Number: CR0402AJ/-000GLF; Supplier: Digikey; Supplier Part Number: 118-CR0402AJ/-000GLFTR-ND; Case/Package: 0402; Value: 0R
footprint RES_0402
pins: 1, 2

## RES_1.87K_0.063W_1%_0402
designator R?, comment 1.87K
RES 1.87K OHM 1% 1/16W 0402; Manufacturer: Vishay Dale; Manufacturer Part Number: CRCW04021K87FKED; Supplier: Digikey; Supplier Part Number: 541-1.87KLTR-ND; Case/Package: 0402; Value: 1.87K
footprint RES_0402
pins: 1, 2

## RES_1K_0.063W_5%_0402
designator R?, comment 1K
RES 1K OHM 5% 1/16W 0402; Manufacturer: YAGEO; Manufacturer Part Number: RC0402JR-071KL; Supplier: Digikey; Supplier Part Number: 311-1.0KJRTR-ND; Case/Package: 0402; Value: 1K
footprint RES_0402
pins: 1, 2

## RES_1R_0.063W_5%_0402
designator R?, comment 1R
RES 1 OHM 5% 1/16W 0402; Manufacturer: Vishay Dale; Manufacturer Part Number: CRCW04021R00JNED; Supplier: Digikey; Supplier Part Number: 541-1.0JTR-ND; Case/Package: 0402; Value: 1R
footprint RES_0402
pins: 1, 2

## RES_1R_0.125W_1%_0603
designator R?, comment 1R
RES SMD 1 OHM 1% 1/8W 0603; Manufacturer: Vishay Dale; Manufacturer Part Number: CRCW06031R00FKEA; Supplier: Digikey; Supplier Part Number: 541-1.00HHTR-ND; Case/Package: 0603; Value: 1R
footprint RES_0603 (CASE: 0603)
pins: 1, 2

## RES_2M_0.1W_5%_0603
designator R?, comment 2M
RES 2 MOHM 5% 1/10W 0603; Manufacturer: YAGEO; Manufacturer Part Number: RC0603JR-132ML; Supplier: Digikey; Supplier Part Number: 13-RC0603JR-132MLTR-ND; Case/Package: 0603; Value: 2M
footprint RES_0603 (CASE: 0603)
pins: 1, 2

## RES_4.7K_0.063W_5%_0402
designator R?, comment 4.7K
RES 4.7K OHM 5% 1/16W 0402; Manufacturer: YAGEO; Manufacturer Part Number: RC0402JR-074K7L; Supplier: Digikey; Supplier Part Number: 311-4.7KJRTR-ND; Case/Package: 0402; Value: 4.7K
footprint RES_0402
pins: 1, 2

## RES_4.99K_0.063W_1%_0402
designator R?, comment 4.99K
RES 4.99K OHM 1% 1/16W 0402; Manufacturer: Vishay Dale; Manufacturer Part Number: CRCW04024K99FKEDC; Supplier: Digikey; Supplier Part Number: 541-3972-2-ND; Case/Package: 0402; Value: 4.99K
footprint RES_0402
pins: 1, 2

## RES_4.99R_0.063W_1%_0402
designator R?, comment 4.99R
RES 4.99 OHM 1% 1/16W 0402; Manufacturer: Vishay Dale; Manufacturer Part Number: CRCW04024R99FKED; Supplier: Digikey; Supplier Part Number: 541-4.99LLTR-ND; Case/Package: 0402; Value: 4.99R
footprint RES_0402
pins: 1, 2

## RES_5.49K_0.063W_1%_0402
designator R?, comment 5.49K
RES 5.49K OHM 1% 1/16W 0402; Manufacturer: Vishay Dale; Manufacturer Part Number: CRCW04025K49FKED; Supplier: Digikey; Supplier Part Number: 541-5.49KLTR-ND; Case/Package: 0402; Value: 5.49K
footprint RES_0402
pins: 1, 2

## RES_6.04K_0.063W_1%_0402
designator R?, comment 6.04K
RES 6.04K OHM 1% 1/16W 0402; Manufacturer: Vishay Dale; Manufacturer Part Number: CRCW04026K04FKED; Supplier: Digikey; Supplier Part Number: 541-6.04KLTR-ND; Case/Package: 0402; Value: 6.04K
footprint RES_0402
pins: 1, 2

## RES_10K_0.1W_1%_0603
designator R?, comment 10K
RES 10K OHM 1% 1/10W 0603; Manufacturer: YAGEO; Manufacturer Part Number: RC0603FR-0710KL; Supplier: Digikey; Supplier Part Number: 311-10.0KHRTR-ND; Case/Package: 0603; Value: 10K
footprint RES_0603 (CASE: 0603)
pins: 1, 2

## RES_10K_0.05W_1%_0201
designator R?, comment 10K
RES 10K OHM 1% 1/20W 0201; Manufacturer: YAGEO; Manufacturer Part Number: RC0201FR-0710KL; Supplier: Digikey; Supplier Part Number: 311-10.0KMTR-ND; Case/Package: 0201; Value: 10K
footprint RES_0201
pins: 1, 2

## RES_10K_0.25W_1%_1206
designator R?, comment 10K
RES 10K OHM 1% 1/4W 1206; Manufacturer: YAGEO; Manufacturer Part Number: RC1206FR-0710KL; Supplier: Digikey; Supplier Part Number: 311-10.0KFRTR-ND; Case/Package: 1206; Value: 10K
footprint RES_1206 (CASE: 1206)
pins: 1, 2

## RES_10K_0.063W_1%_0402
designator R?, comment 10K
RES 10K OHM 1% 1/16W 0402; Manufacturer: YAGEO; Manufacturer Part Number: RC0402FR-0710KL; Supplier: Digikey; Supplier Part Number: 311-10.0KLRTR-ND; Case/Package: 0402; Value: 10K
footprint RES_0402
pins: 1, 2

## RES_10K_0.125W_1%_0805
designator R?, comment 10K
RES 10K OHM 1% 1/8W 0805; Manufacturer: YAGEO; Manufacturer Part Number: RC0805FR-0710KL; Supplier: Digikey; Supplier Part Number: 311-10.0KCRTR-ND; Case/Package: 0805; Value: 10K
footprint RES_0805 (Resister)
pins: 1, 2

## RES_10m_0.25W_1%_1206
designator R?, comment 10mR
RES 0.01 OHM 1% 1/4W 1206; Manufacturer: YAGEO; Manufacturer Part Number: RL1206FR-070R01L; Supplier: Digikey; Supplier Part Number: 311-0.01LWTR-ND; Case/Package: 1206; Value: 10mR
footprint RES_1206 (CASE: 1206)
pins: 1, 2

## RES_10m_1W_1%_1206
designator R?, comment 10mR
RES 0.01 OHM 1% 1W 1206; Manufacturer: Vishay Dale; Manufacturer Part Number: WSLP1206R0100FEA; Supplier: Digikey; Supplier Part Number: WSLP-.01TR-ND; Case/Package: 1206; Value: 10mR
footprint RES_1206 (CASE: 1206)
pins: 1, 2

## RES_10R_0.063W_1%_0402
designator R?, comment 10R
RES 10 OHM 1% 1/16W 0402; Manufacturer: Vishay Dale; Manufacturer Part Number: CRCW040210R0FKED; Supplier: Digikey; Supplier Part Number: 541-10.0LTR-ND; Case/Package: 0402; Value: 10R
footprint RES_0402
pins: 1, 2

## RES_11K_0.063W_1%_0402
designator R?, comment 11K
RES 11K OHM 1% 1/16W 0402; Manufacturer: Vishay Dale; Manufacturer Part Number: CRCW040211K0FKED; Supplier: Digikey; Supplier Part Number: 541-11.0KLTR-ND; Case/Package: 0402; Value: 11K
footprint RES_0402
pins: 1, 2

## RES_12.1K_0.05W_1%_0201
designator R?, comment 12.1K
RES 12.1K OHM 1% 1/20W 0201; Manufacturer: YAGEO; Manufacturer Part Number: RC0201FR-0712K1L; Supplier: Digikey; Supplier Part Number: 311-12.1KMTR-ND; Case/Package: 0201; Value: 12.1K
footprint RES_0201
pins: 1, 2

## RES_14K_0.05W_1%_0201
designator R?, comment 14K
RES 14K OHM 1% 1/20W 0201; Manufacturer: YAGEO; Manufacturer Part Number: RC0201FR-0714KL; Supplier: Digikey; Supplier Part Number: YAG2413TR-ND; Case/Package: 0201; Value: 14K
footprint RES_0201
pins: 1, 2

## RES_15.4K_0.063W_1%_0402
designator R?, comment 15.4K
RES SMD 15.4K OHM 1% 1/16W 0402; Manufacturer: YAGEO; Manufacturer Part Number: AC0402FR-0715K4L; Supplier: Digikey; Supplier Part Number: 13-AC0402FR-0715K4LTR-ND; Case/Package: 0402; Value: 15.4K
footprint RES_0402
pins: 1, 2

## RES_19.1K_0.063W_1%_0402
designator R?, comment 19.1K
RES SMD 19.1K OHM 1% 1/16W 0402; Manufacturer: YAGEO; Manufacturer Part Number: AC0402FR-0719K1L; Supplier: Digikey; Supplier Part Number: AC0402FR-0719K1L; Case/Package: 0402; Value: 19.1K
footprint RES_0402
pins: 1, 2

## RES_22.1K_0.063W_1%_0402
designator R?, comment 22.1K
RES 22.1K OHM 1% 1/16W 0402; Manufacturer: Vishay Dale; Manufacturer Part Number: CRCW040222K1FKED; Supplier: Digikey; Supplier Part Number: 541-22.1KLTR-ND; Case/Package: 0402; Value: 22.1K
footprint RES_0402
pins: 1, 2

## RES_22R_0.063W_1%_0402
designator R?, comment 22R
RES 22 OHM 1% 1/16W 0402; Manufacturer: YAGEO; Manufacturer Part Number: RC0402FR-0722RL; Supplier: Digikey; Supplier Part Number: 311-22.0LRTR-ND; Case/Package: 0402; Value: 22R
footprint RES_0402
pins: 1, 2

## RES_24.9K_0.1W_1%_0603
designator R?, comment 24.9K
RES 24.9K OHM 1% 1/10W 0603; Manufacturer: YAGEO; Manufacturer Part Number: RC0603FR-0724K9L; Supplier: Digikey; Supplier Part Number: 311-24.9KHRTR-ND; Case/Package: 0603; Value: 24.9K
footprint RES_0603 (CASE: 0603)
pins: 1, 2

## RES_24K_0.1W_1%_0603
designator R?, comment 24K
RES 24K OHM 1% 1/10W 0603; Manufacturer: YAGEO; Manufacturer Part Number: RC0603FR-0724KL; Supplier: Digikey; Supplier Part Number: 311-24.0KHRTR-ND; Case/Package: 0603; Value: 24K
footprint RES_0603 (CASE: 0603)
pins: 1, 2

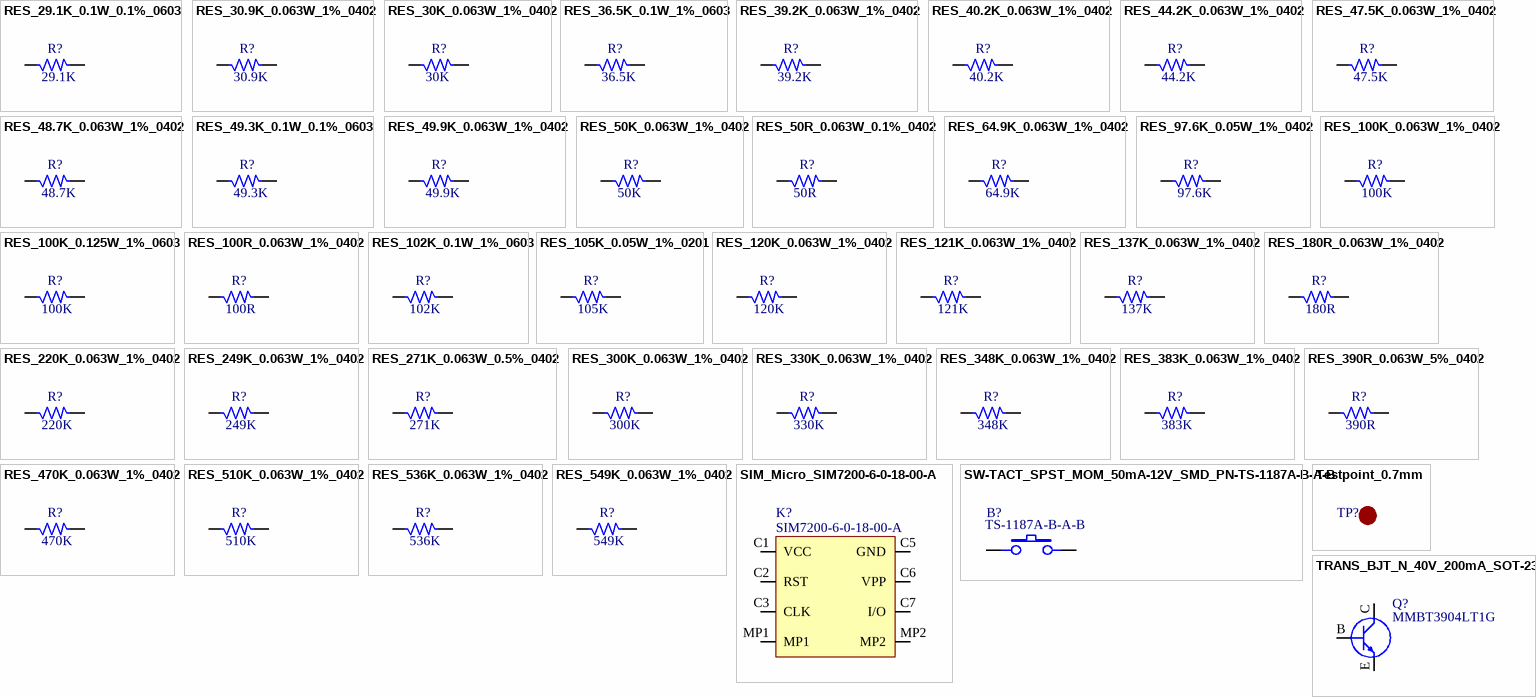
[diagram p7: symbols RES_29.1K_0.1W_0.1%_0603 to TRANS_BJT_N_40V_200mA_SOT-23-3]

## RES_29.1K_0.1W_0.1%_0603
designator R?, comment 29.1K
RES 29.1K OHM 0.1% 1/10W 0603; Manufacturer: KOA Speer Electronics, Inc.; Manufacturer Part Number: RN73R1JTTD2912B25; Supplier: Digikey; Supplier Part Number: 2019-RN73R1JTTD2912B25TR-ND; Case/Package: 0603; Value: 29.1K
footprint RES_0603 (CASE: 0603)
pins: 1, 2

## RES_30.9K_0.063W_1%_0402
designator R?, comment 30.9K
RES 30.9K OHM 1% 1/16W 0402; Manufacturer: Vishay Dale; Manufacturer Part Number: CRCW040230K9FKED; Supplier: Digikey; Supplier Part Number: 541-30.9KLTR-ND; Case/Package: 0402; Value: 30.9K
footprint RES_0402
pins: 1, 2

## RES_30K_0.063W_1%_0402
designator R?, comment 30K
RES 30K OHM 1% 1/16W 0402; Manufacturer: YAGEO; Manufacturer Part Number: RC0402FR-0730KL; Supplier: Digikey; Supplier Part Number: 311-30.0KLRTR-ND; Case/Package: 0402; Value: 30K
footprint RES_0402
pins: 1, 2

## RES_36.5K_0.1W_1%_0603
designator R?, comment 36.5K
RES 36.5K OHM 1% 1/10W 0603; Manufacturer: KOA Speer Electronics, Inc.; Manufacturer Part Number: RK73H1JTTD3652F; Supplier: Digikey; Supplier Part Number: 2019-RK73H1JTTD3652FTR-ND; Case/Package: 0603; Value: 36.5K
footprint RES_0603 (CASE: 0603)
pins: 1, 2

## RES_39.2K_0.063W_1%_0402
designator R?, comment 39.2K
RES 39.2K OHM 1% 1/16W 0402; Manufacturer: Vishay Dale; Manufacturer Part Number: CRCW040239K2FKED; Supplier: Digikey; Supplier Part Number: 541-39.2KLTR-ND; Case/Package: 0402; Value: 39.2K
footprint RES_0402
pins: 1, 2

## RES_40.2K_0.063W_1%_0402
designator R?, comment 40.2K
RES 40.2K OHM 1% 1/16W 0402; Manufacturer: Vishay Dale; Manufacturer Part Number: CRCW040240K2FKED; Supplier: Digikey; Supplier Part Number: 541-40.2KLTR-ND; Case/Package: 0402; Value: 40.2K
footprint RES_0402
pins: 1, 2

## RES_44.2K_0.063W_1%_0402
designator R?, comment 44.2K
RES 44.2K OHM 1% 1/16W 0402; Manufacturer: YAGEO; Manufacturer Part Number: AC0402FR-0744K2L; Supplier: Digikey; Supplier Part Number: YAG5295TR-ND; Case/Package: 0402; Value: 44.2K
footprint RES_0402
pins: 1, 2

## RES_47.5K_0.063W_1%_0402
designator R?, comment 47.5K
RES 47.5K OHM 1% 1/16W 0402; Manufacturer: Vishay Dale; Manufacturer Part Number: CRCW040247K5FKED; Supplier: Digikey; Supplier Part Number: 541-47.5KLTR-ND; Case/Package: 0402; Value: 47.5K
footprint RES_0402
pins: 1, 2

## RES_48.7K_0.063W_1%_0402
designator R?, comment 48.7K
RES 48.7K OHM 1% 1/16W 0402; Manufacturer: Vishay Dale; Manufacturer Part Number: CRCW040248K7FKED; Supplier: Digikey; Supplier Part Number: 541-48.7KLTR-ND; Case/Package: 0402; Value: 48.7K
footprint RES_0402
pins: 1, 2

## RES_49.3K_0.1W_0.1%_0603
designator R?, comment 49.3K
RES SMD 49.3KOHM 0.1% 1/10W 0603; Manufacturer: YAGEO; Manufacturer Part Number: RT0603BRD0749K3L; Supplier: Digikey; Supplier Part Number: 13-RT0603BRD0749K3LTR-ND; Case/Package: 0603; Value: 49.3K
footprint RES_0603 (CASE: 0603)
pins: 1, 2

## RES_49.9K_0.063W_1%_0402
designator R?, comment 49.9K
RES 49.9K OHM 1% 1/16W 0402; Manufacturer: Vishay Dale; Manufacturer Part Number: CRCW040249K9FKED; Supplier: Digikey; Supplier Part Number: 541-49.9KLTR-ND; Case/Package: 0402; Value: 49.9K
footprint RES_0402
pins: 1, 2

## RES_50K_0.063W_1%_0402
designator R?, comment 50K
RES 50K OHM 1% 1/16W 0402; Manufacturer: Vishay Dale; Manufacturer Part Number: CRCW040250K0FKED; Supplier: Digikey; Supplier Part Number: 541-CRCW040250K0FKEDTR-ND; Case/Package: 0402; Value: 50K
footprint RES_0402
pins: 1, 2

## RES_50R_0.063W_0.1%_0402
designator R?, comment 50R
RES SMD 50 OHM 0.1% 1/16W 0402; Manufacturer: YAGEO; Manufacturer Part Number: RT0402BRE0750RL; Supplier: Digikey; Supplier Part Number: 13-RT0402BRE0750RLTR-ND; Case/Package: 0402; Value: 50R
footprint RES_0402
pins: 1, 2

## RES_64.9K_0.063W_1%_0402
designator R?, comment 64.9K
RES 64.9K OHM 1% 1/16W 0402; Manufacturer: YAGEO; Manufacturer Part Number: RC0402FR-1364K9L; Supplier: Digikey; Supplier Part Number: 13-RC0402FR-1364K9LTR-ND; Case/Package: 0402; Value: 64.9K
footprint RES_0402
pins: 1, 2

## RES_97.6K_0.05W_1%_0402
designator R?, comment 97.6K
RES 97.6K OHM 1% 1/16W 0402; Manufacturer: Vishay Dale; Manufacturer Part Number: CRCW040297K6FKED; Supplier: Digikey; Supplier Part Number: 541-97.6KLTR-ND; Case/Package: 0402; Value: 97.6K
footprint RES_0402
pins: 1, 2

## RES_100K_0.063W_1%_0402
designator R?, comment 100K
RES 100K OHM 1% 1/16W 0402; Manufacturer: Vishay Dale; Manufacturer Part Number: CRCW0402100KFKED; Supplier: Digikey; Supplier Part Number: 541-100KLTR-ND; Case/Package: 0402; Value: 100K
footprint RES_0402
pins: 1, 2

## RES_100K_0.125W_1%_0603
designator R?, comment 100K
RES SMD 100K OHM 1% 1/8W 0603; Manufacturer: Vishay Dale; Manufacturer Part Number: CRCW0603100KFKEA; Supplier: Digikey; Supplier Part Number: 541-100KHTR-ND; Case/Package: 0603; Value: 100K
footprint RES_0603 (CASE: 0603)
pins: 1, 2

## RES_100R_0.063W_1%_0402
designator R?, comment 100R
RES 100 OHM 1% 1/16W 0402; Manufacturer: YAGEO; Manufacturer Part Number: RC0402FR-07100RL; Supplier: Digikey; Supplier Part Number: 311-100LRTR-ND; Case/Package: 0402; Value: 100R
footprint RES_0402
pins: 1, 2

## RES_102K_0.1W_1%_0603
designator R?, comment 102K
RES SMD 102K OHM 1% 1/10W 0603; Manufacturer: Panasonic Industry; Manufacturer Part Number: ERJ-3EKF1023V; Supplier: Digikey; Supplier Part Number: P102KHTR-ND; Case/Package: 0603; Value: 102K
pins: 1, 2

## RES_105K_0.05W_1%_0201
designator R?, comment 105K
RES 105K OHM 1% 1/20W 0201; Manufacturer: YAGEO; Manufacturer Part Number: RC0201FR-07105KL; Supplier: Digikey; Supplier Part Number: 311-105KMTR-ND; Case/Package: 0201; Value: 105K
footprint RES_0201
pins: 1, 2

## RES_120K_0.063W_1%_0402
designator R?, comment 120K
RES 120K OHM 1% 1/16W 0402; Manufacturer: YAGEO; Manufacturer Part Number: RC0402FR-07120KL; Supplier: Digikey; Supplier Part Number: 311-120KLRTR-ND; Case/Package: 0402; Value: 120K
footprint RES_0402
pins: 1, 2

## RES_121K_0.063W_1%_0402
designator R?, comment 121K
RES 121K OHM 1% 1/16W 0402; Manufacturer: Vishay Dale; Manufacturer Part Number: CRCW0402121KFKED; Supplier: Digikey; Supplier Part Number: 541-121KLTR-ND; Case/Package: 0402; Value: 121K
footprint RES_0402
pins: 1, 2

## RES_137K_0.063W_1%_0402
designator R?, comment 137K
RES 137K OHM 1% 1/16W 0402; Manufacturer: YAGEO; Manufacturer Part Number: RC0402FR-07137KL; Supplier: Digikey; Supplier Part Number: YAG2972TR-ND; Case/Package: 0402; Value: 137K
footprint RES_0402
pins: 1, 2

## RES_180R_0.063W_1%_0402
designator R?, comment 180R
RES 180 OHM 1% 1/16W 0402; Manufacturer: YAGEO; Manufacturer Part Number: RC0402FR-07180RL; Supplier: Digikey; Supplier Part Number: 311-180LRTR-ND; Case/Package: 0402; Value: 180R
footprint RES_0402
pins: 1, 2

## RES_220K_0.063W_1%_0402
designator R?, comment 220K
RES 220K OHM 1% 1/16W 0402; Manufacturer: YAGEO; Manufacturer Part Number: RC0402FR-07220KL; Supplier: Digikey; Supplier Part Number: 311-220KLRTR-ND; Case/Package: 0402; Value: 220K
footprint RES_0402
pins: 1, 2

## RES_249K_0.063W_1%_0402
designator R?, comment 249K
RES 249K OHM 1% 1/16W 0402; Manufacturer: YAGEO; Manufacturer Part Number: RC0402FR-07249KL; Supplier: Digikey; Supplier Part Number: 311-249KLRTR-ND; Case/Package: 0402; Value: 249K
footprint RES_0402
pins: 1, 2

## RES_271K_0.063W_0.5%_0402
designator R?, comment 271K
RES 271K OHM 0.5% 1/16W 0402; Manufacturer: KOA Speer Electronics, Inc.; Manufacturer Part Number: RN73R1ETTP2713D25; Supplier: Digikey; Supplier Part Number: 2019-RN73R1ETTP2713D25TR-ND; Case/Package: 0402; Value: 271K
footprint RES_0402
pins: 1, 2

## RES_300K_0.063W_1%_0402
designator R?, comment 300K
RES 300K OHM 1% 1/16W 0402; Manufacturer: YAGEO; Manufacturer Part Number: RC0402FR-13300KL; Supplier: Digikey; Supplier Part Number: 13-RC0402FR-13300KLTR-ND; Case/Package: 0402; Value: 300K
footprint RES_0402
pins: 1, 2

## RES_330K_0.063W_1%_0402
designator R?, comment 330K
RES 330K OHM 1% 1/16W 0402; Manufacturer: TE Connectivity Passive Product; Manufacturer Part Number: CRGCQ0402F330K; Supplier: Digikey; Supplier Part Number: A129657TR-ND; Case/Package: 0402; Value: 330K
footprint RES_0402
pins: 1, 2

## RES_348K_0.063W_1%_0402
designator R?, comment 348K
RES 348K OHM 1% 1/16W 0402; Manufacturer: Vishay Dale; Manufacturer Part Number: CRCW0402348KFKED; Supplier: Digikey; Supplier Part Number: 541-348KLTR-ND; Case/Package: 0402; Value: 348K
footprint RES_0402
pins: 1, 2

## RES_383K_0.063W_1%_0402
designator R?, comment 383K
RES 383K OHM 1% 1/16W 0402; Manufacturer: Vishay Dale; Manufacturer Part Number: CRCW0402383KFKED; Supplier: Digikey; Supplier Part Number: 541-383KLTR-ND; Case/Package: 0402; Value: 383K
footprint RES_0402
pins: 1, 2

## RES_390R_0.063W_5%_0402
designator R?, comment 390R
RES 390 OHM 5% 1/16W 0402; Manufacturer: YAGEO; Manufacturer Part Number: RC0402JR-07390RL; Supplier: Digikey; Supplier Part Number: 311-390JRTR-ND; Case/Package: 0402; Value: 390R
footprint RES_0402
pins: 1, 2

## RES_470K_0.063W_1%_0402
designator R?, comment 470K
RES 470K OHM 1% 1/16W 0402; Manufacturer: Vishay Dale; Manufacturer Part Number: CRCW0402470KFKED; Supplier: Digikey; Supplier Part Number: 541-470KLTR-ND; Case/Package: 0402; Value: 470K
footprint RES_0402
pins: 1, 2

## RES_510K_0.063W_1%_0402
designator R?, comment 510K
RES 510K OHM 1% 1/16W 0402; Manufacturer: Vishay Dale; Manufacturer Part Number: CRCW0402510KFKED; Supplier: Digikey; Supplier Part Number: 541-510KLTR-ND; Case/Package: 0402; Value: 510K
footprint RES_0402
pins: 1, 2

## RES_536K_0.063W_1%_0402
designator R?, comment 536K
RES 536K OHM 1% 1/16W 0402; Manufacturer: Vishay Dale; Manufacturer Part Number: CRCW0402536KFKED; Supplier: Digikey; Supplier Part Number: 541-536KLTR-ND; Case/Package: 0402; Value: 536K
footprint RES_0402
pins: 1, 2

## RES_549K_0.063W_1%_0402
designator R?, comment 549K
RES 549K OHM 1% 1/16W 0402; Manufacturer: Vishay Dale; Manufacturer Part Number: CRCW0402549KFKED; Supplier: Digikey; Supplier Part Number: 541-549KLTR-ND; Case/Package: 0402; Value: 549K
footprint RES_0402
pins: 1, 2

## SIM_Micro_SIM7200-6-0-18-00-A
designator K?, comment SIM7200-6-0-18-00-A
6 Position Card Connector Micro SIM Surface Mount, Right Angle Gold; Manufacturer: GCT; Manufacturer Part Number: SIM7200-6-0-18-00-A; Supplier: Digikey; Supplier Part Number: 2073-SIM7200-6-0-18-00-ATR-ND
pins: C1 VCC, C2 RST, C3 CLK, C5 GND, C6 VPP, C7 I/O, MP1, MP2

## SW-TACT_SPST_MOM_50mA-12V_SMD_PN-TS-1187A-B-A-B
designator B?, comment TS-1187A-B-A-B
SWITCH TACTILE SPST 160gf SMD; Manufacturer: XKB Connectivity; Manufacturer Part Number: TS-1187A-B-A-B; Supplier: JLC; Supplier Part Number: C318884; Case/Package: SPST SMD Tactile Switches; JLC Part Number: C318884
footprint TS-1187A-B-A-B
pins: A, C

## Testpoint_0.7mm
designator TP?  (value not drawn)  (no BOM)
footprint testpoint
pins: 1

## TRANS_BJT_N_40V_200mA_SOT-23-3
designator Q?, comment MMBT3904LT1G
Bipolar (BJT) Transistor NPN 40 V 200 mA 300MHz 300 mW Surface Mount SOT-23-3 (TO-236); Manufacturer: onsemi; Value: 40V/200mA; Manufacturer Part Number: MMBT3904LT1G; Supplier: Digikey; Supplier Part Number: MMBT3904LT1GOSTR-ND; Case/Package: MMBT3904LT1G
footprint SOT95P240X111-3N
pins: B, C, E

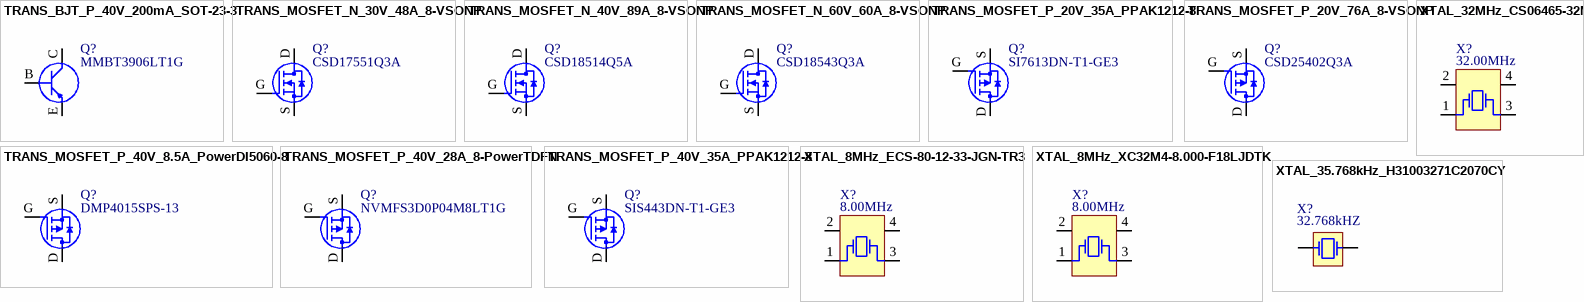
[diagram p8: symbols TRANS_BJT_P_40V_200mA_SOT-23-3 to XTAL_35.768kHz_H31003271C2070CY]

## TRANS_BJT_P_40V_200mA_SOT-23-3
designator Q?, comment MMBT3906LT1G
Bipolar (BJT) Transistor PNP 40 V 200 mA 250MHz 300 mW Surface Mount SOT-23-3 (TO-236); Manufacturer: onsemi; Value: 40V/200mA; Manufacturer Part Number: MMBT3906LT1G; Supplier: Digikey; Supplier Part Number: MMBT3906LT1GOSTR-ND; Case/Package: SOT-23-3
pins: B, C, E

## TRANS_MOSFET_N_30V_48A_8-VSONP
designator Q?, comment CSD17551Q3A
N-Channel 30 V 12A (Tc) 2.6W (Ta) Surface Mount 8-VSONP (3x3.3); Manufacturer: Texas Instruments; Value: 30V/48A; Manufacturer Part Number: CSD17551Q3A; Supplier: Digikey; Supplier Part Number: 296-35025-2-ND; Case/Package: 8-VSONP
pins: D, G, S

## TRANS_MOSFET_N_40V_89A_8-VSONP
designator Q?, comment CSD18514Q5A
N-Channel 40 V 89A (Tc) 74W (Tc) Surface Mount 8-VSONP (5x6); Manufacturer: Texas Instruments; Value: 40V/89A; Manufacturer Part Number: CSD18514Q5A; Supplier: Digikey; Supplier Part Number: 296-47757-2-ND; Case/Package: 8VSON
footprint TRANS-CSD18514Q5A
pins: D, G, S

## TRANS_MOSFET_N_60V_60A_8-VSONP
designator Q?, comment CSD18543Q3A
N-Channel 60 V 60A (Tc) 66W (Tc) Surface Mount 8-VSONP (3x3.3); Manufacturer: Texas Instruments; Value: 60V/60A; Manufacturer Part Number: CSD18543Q3A; Supplier: Digikey; Supplier Part Number: 296-47321-2-ND; Case/Package: 8-VSONP
footprint TRANS_CSD18543Q3A
pins: D, G, S

## TRANS_MOSFET_P_20V_35A_PPAK1212-8
designator Q?, comment SI7613DN-T1-GE3
P-Channel 20 V 35A (Tc) 3.8W (Ta), 52.1W (Tc) Surface Mount PowerPAK® 1212-8; Manufacturer: Vishay Siliconix; Value: 20V/35A; Manufacturer Part Number: SI7613DN-T1-GE3; Supplier: Digikey; Supplier Part Number: SI7613DN-T1-GE3TR-ND; Case/Package: PPAK1212-8; ComponentLink1Description: Datasheet; ComponentLink1URL: https://www.vishay.com/docs/64809/si7613dn.pdf
footprint MOSFET_1DN-T1-GE3_VIS
pins: D, G, S

## TRANS_MOSFET_P_20V_76A_8-VSONP
designator Q?, comment CSD25402Q3A
P-Channel 20 V 76A (Tc) 2.8W (Ta), 69W (Tc) Surface Mount 8-VSONP (3x3.3); Manufacturer: Texas Instruments; Value: 20V/76A; Manufacturer Part Number: CSD25402Q3A; Supplier: Mouser; Supplier Part Number: 595-CSD25402Q3A; Case/Package: 8-VSONP
pins: D, G, S

## TRANS_MOSFET_P_40V_8.5A_PowerDI5060-8
designator Q?, comment DMP4015SPS-13
P-Channel 40 V 8.5A (Ta) 1.3W (Ta) Surface Mount PowerDI5060-8; Manufacturer: Diodes Incorporated; Value: 40V/8.5A; Manufacturer Part Number: DMP4015SPS-13; Supplier: Digikey; Supplier Part Number: DMP4015SPS-13DITR-ND; Case/Package: PowerDI5060-8
pins: D, G, S

## TRANS_MOSFET_P_40V_28A_8-PowerTDFN
designator Q?, comment NVMFS3D0P04M8LT1G
P-Channel 40 V 28A (Ta), 183A (Tc) 3.9W (Ta), 171W (Tc) Surface Mount 5-DFN (5x6) (8-SOFL); Manufacturer: onsemi; Value: 40V/28A; Manufacturer Part Number: NVMFS3D0P04M8LT1G; Supplier: Digikey; Supplier Part Number: 488-NVMFS3D0P04M8LT1GTR-ND; Case/Package: 5-DFN (5x6) (8-SOFL)
footprint DFN5_SO-8FL_ONS_OSI
pins: D, G, S

## TRANS_MOSFET_P_40V_35A_PPAK1212-8
designator Q?, comment SIS443DN-T1-GE3
P-Channel 40 V 35A (Tc) 3.7W (Ta), 52W (Tc) Surface Mount PowerPAK® 1212-8; Manufacturer: Vishay Siliconix; Value: 40V/35A; Manufacturer Part Number: SIS443DN-T1-GE3; Supplier: Digikey; Supplier Part Number: SIS443DN-T1-GE3TR-ND; Case/Package: PPAK1212-8; ComponentLink1Description: Datasheet; ComponentLink1URL: https://www.vishay.com/docs/64809/si7613dn.pdf
footprint MOSFET_1DN-T1-GE3_VIS
pins: D, G, S

## XTAL_8MHz_ECS-80-12-33-JGN-TR3
designator X?, comment value 8.00MHz  (hidden comment: ECS-80-12-33-JGN-TR3)
8 MHz ±20ppm Crystal 12pF 400 Ohms 4-SMD, No Lead; Manufacturer: ECS Inc.; Manufacturer Part Number: 50-ECS-80-12-33-JGN-TR3TR-ND; Supplier: Digikey; Supplier Part Number: ECS-80-12-33-JGN-TR3; Case/Package: 4-SMD
pins: 1, 2, 3, 4
2 alternate drawings of the same symbol

## XTAL_8MHz_XC32M4-8.000-F18LJDTK
designator X?, comment value 8.00MHz  (hidden comment: XC32M4-8.000-F18LJDTK)
8 MHz ±20ppm Crystal 18pF 400 Ohms 4-SMD, No Lead; Manufacturer: Suzhou Hangjing Elec&Tech Co.,Ltd; Supplier: Digikey; Supplier Part Number: 4309-XC32M4-8.000-F18LJDTKCS-ND; Manufacturer Part Number: XC32M4-8.000-F18LJDT; Case/Package: 4-SMD
footprint XTAL3225-4P
pins: 1, 2, 3, 4
2 alternate drawings of the same symbol

## XTAL_32MHz_CS06465-32M
designator X?, comment value 32.00MHz  (hidden comment: CS06465-32M)
32 MHz ±10ppm Crystal 10pF 50 Ohms 4-SMD, No Lead; Manufacturer: NDK; Supplier: Digikey; Supplier Part Number: 644-CS06465-32MTR-ND; Manufacturer Part Number: CS06465-32M; Case/Package: 4-SMD
pins: 1, 2, 3, 4
2 alternate drawings of the same symbol

## XTAL_35.768kHz_H31003271C2070CY
designator X?, comment value 32.768kHZ  (hidden comment: H31003271C2070CY)
32.768kHz 12.5pF ±20ppm ±30ppm SMD3215-2P Crystals; Manufacturer: JGHC; Supplier: LCSC; Supplier Part Number: C5361379; Manufacturer Part Number: H31003271C2070CY; Case/Package: SMD3215
footprint XTAL3215-2P
pins: 1, 2 1